# Altium footprint library ESPRESSIF_ESP32-S3-WROOM-1.PcbLib: 1 footprints
Each footprint in its own frame and in the unit in brackets; x right, y up, seen from the top. Pads: shape width x height; smd on the part's side, far side on the other; paste and mask are expansions set on the pad; w line width, h text height; cw(c..) or ccw(c..) is an arc to the next point about the centre after c.
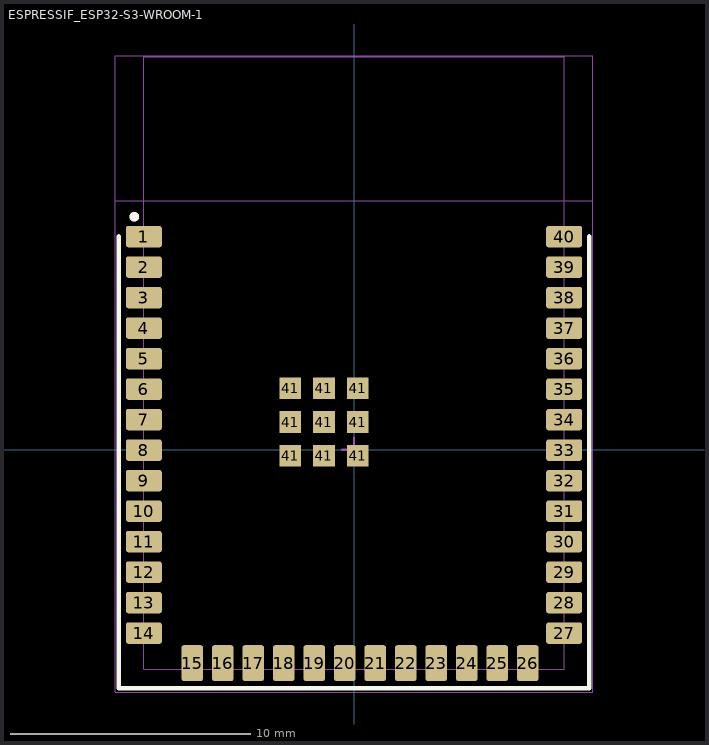
[diagram p0: the footprint, top view; thin cyan lines are the x and y axes]

## ESPRESSIF_ESP32-S3-WROOM-1 [mm]
height 0.9
pads (49):
  rrect25% 1.5x0.9 smd: 1(-8.75,8.88) 2(-8.75,7.61) 3(-8.75,6.34) 4(-8.75,5.07) 5(-8.75,3.8) 6(-8.75,2.53) 7(-8.75,1.26) 8(-8.75,-0.01) 9(-8.75,-1.28) 10(-8.75,-2.55) 11(-8.75,-3.82) 12(-8.75,-5.09) 13(-8.75,-6.36) 14(-8.75,-7.63) 27(8.75,-7.63) 28(8.75,-6.36) 29(8.75,-5.09) 30(8.75,-3.82) 31(8.75,-2.55) 32(8.75,-1.28) 33(8.75,-0.01) 34(8.75,1.26) 35(8.75,2.53) 36(8.75,3.8) 37(8.75,5.07) 38(8.75,6.34) 39(8.75,7.61) 40(8.75,8.88)
  rrect25% 0.9x1.5 smd: 15(-6.735,-8.88) 16(-5.465,-8.88) 17(-4.195,-8.88) 18(-2.925,-8.88) 19(-1.655,-8.88) 20(-0.385,-8.88) 21(0.885,-8.88) 22(2.155,-8.88) 23(3.425,-8.88) 24(4.695,-8.88) 25(5.965,-8.88) 26(7.235,-8.88)
  rect 0.9x0.9 smd: 41(-2.65,-0.24) 41(-2.65,1.16) 41(-2.65,2.56) 41(-1.25,-0.24) 41(-1.25,1.16) 41(-1.25,2.56) 41(0.15,-0.24) 41(0.15,1.16) 41(0.15,2.56)
Top Overlay:
  circle w0.2: c-9.15,9.71 r0.1
  lines w0.2: -9.8,8.88 -9.8,6.71 -9.8,-9.93 -2.925,-9.93 -0.755,-9.93 9.8,-9.93 9.8,-1.28 9.8,0.89 9.8,8.88
Top 3D Body:
  circle w0.2: c-9.15,9.71 r0.1
  lines w0.051: -8.75,10.37 8.75,10.37 ; -8.75,-9.13 8.75,-9.13 8.75,16.37 -8.75,16.37 -8.75,-9.13
Courtyard Top:
  lines w0.05: -9.95,10.36 -9.95,10.37 -8.75,10.37 9.95,10.37 9.95,10.384 ; -9.95,-10.09 -9.95,16.41 9.95,16.41 9.95,-10.09 -9.95,-10.09
  lines w0.1: -0.5,0 0.5,0 ; 0,-0.5 0,0.5
3D body "ESP32-S3-WROOM-1-N4.STEP": height 3.26, standoff 0.01, extent -8.8,-9.15 9.2,16.35